# Altium footprint library Misc.PcbLib: 14 footprints
Each footprint in its own frame and in the unit in brackets; x right, y up, seen from the top. Pads: shape width x height; smd on the part's side, far side on the other; paste and mask are expansions set on the pad; w line width, h text height; cw(c..) or ccw(c..) is an arc to the next point about the centre after c.
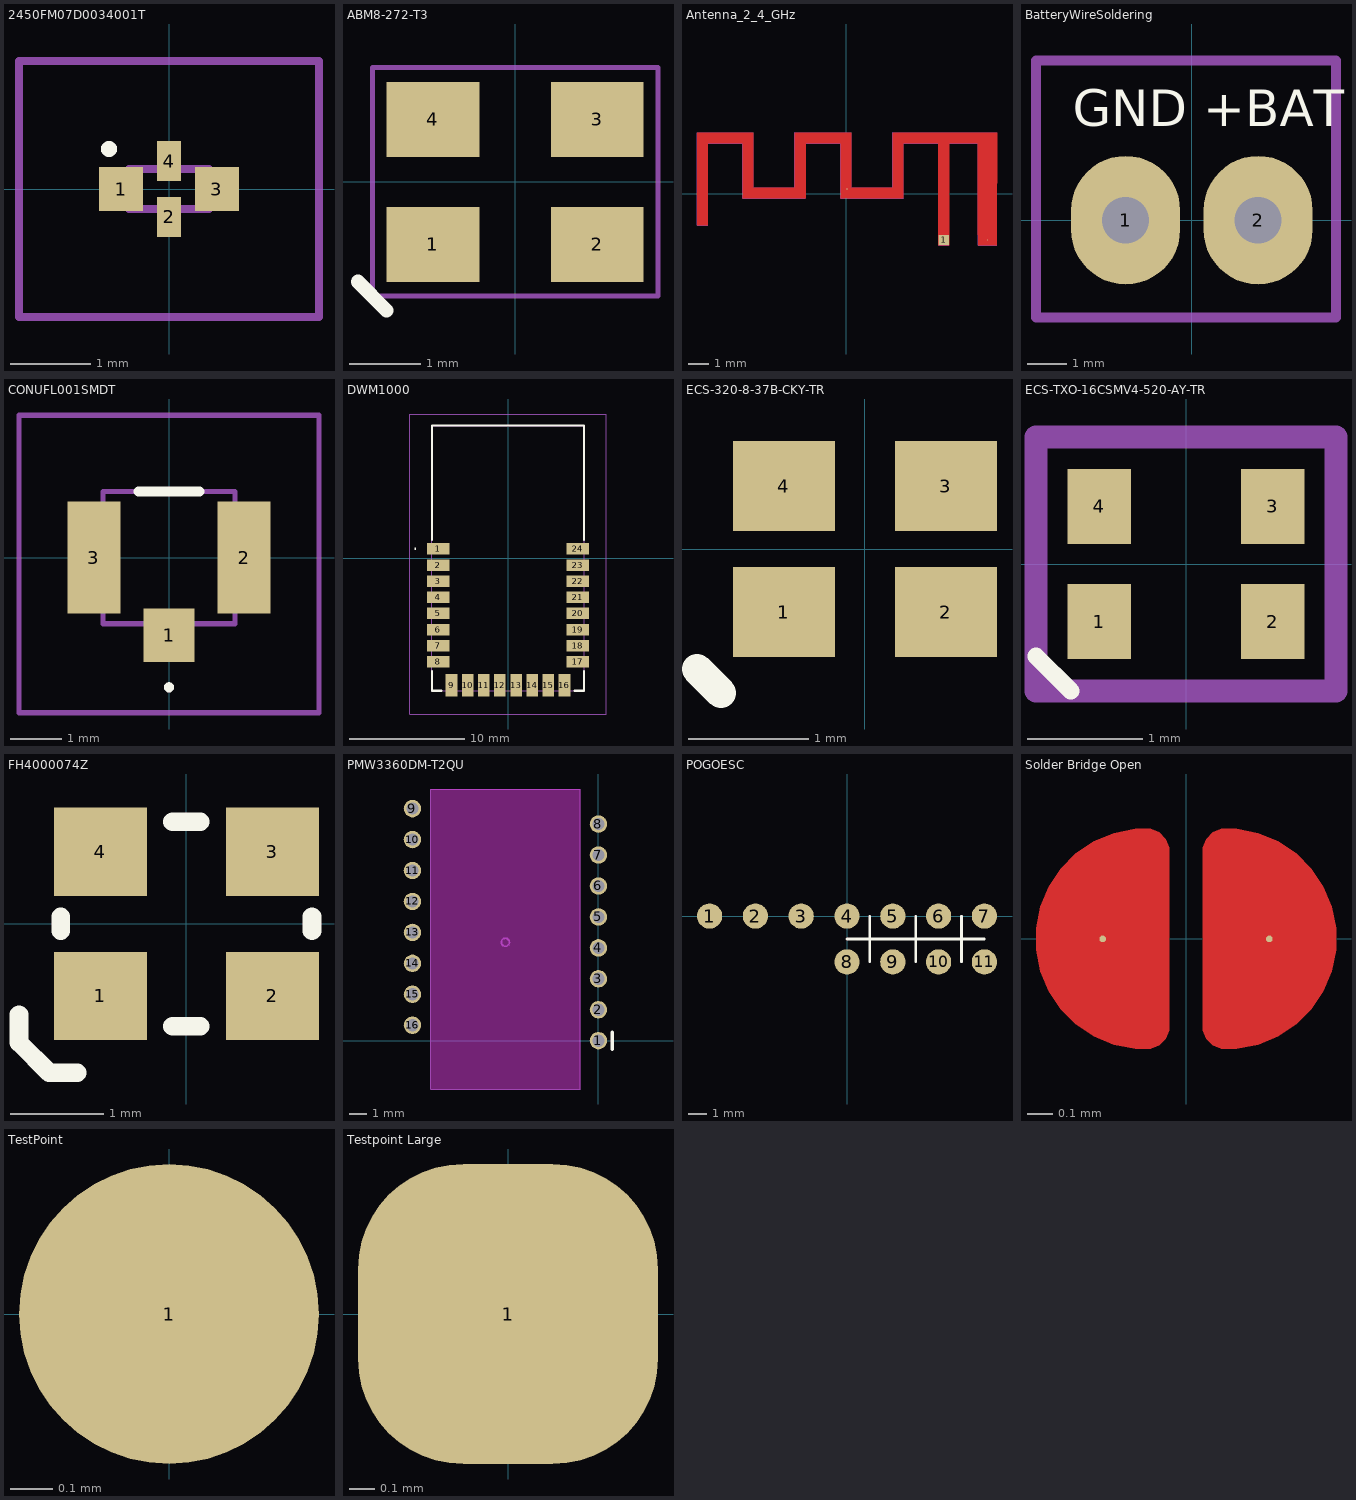
[diagram p0: the footprints below, top view; thin cyan lines are the x and y axes]

## 2450FM07D0034001T [mm]
pads (4):
  rect 0.55x0.55 smd mask-2539.97: 1(-0.6,0) 3(0.6,0)
  rect 0.3x0.5 smd mask+0.102: 2(0,-0.35) 4(0,0.35)
Top Overlay:
  lines w0.1: -0.8,0.5 cw(c-0.75,0.5) -0.7,0.5 cw(c-0.75,0.5) -0.8,0.5
Top Solder:
  region: -0.917,-0.377 -0.917,0.377 -0.163,0.377 -0.163,-0.377
  region: 0.163,-0.377 0.163,0.377 0.917,0.377 0.917,-0.377
Mechanical 15:
  lines w0.1: -0.5,-0.25 0.5,-0.25 0.5,0.25 -0.5,0.25 -0.5,-0.25
Mechanical 20:
  lines w0.1: -1.875,-1.6 1.875,-1.6 1.875,1.6 -1.875,1.6 -1.875,-1.6
3D body "2450FM07D0034001T.stp": height 0.41, standoff 0, extent -0.5,-0.25 0.5,0.25

## ABM8-272-T3 [mm] "Crystals Ultra Miniature Ceramic SMD Crystal / 3.2mm x 2.5mm"
pads (4):
  rect 1.3x1.05 smd mask+0.04: 1(-1.15,-0.875) 2(1.15,-0.875) 3(1.15,0.875) 4(-1.15,0.875)
Top Overlay:
  lines w0.2: -2.2,-1.4 -1.8,-1.8
Mechanical 15:
  lines w0.07: -2,-1.6 2,-1.6 2,1.6 -2,1.6 -2,-1.6
3D body "first version (pad distance not quite alright - datasheet is garbage) v1.step": height 0.8, standoff 0, extent -1.6,-1.25 1.6,1.25

## Antenna_2_4_GHz [mm] "2.4GHz antenna, 15.2x5.7"
pads (3):
  round 0.025 smd paste-2539.97 mask+0.102: 1(0.025,0.225) 2(6.775,-2.225)
  rect 0.5x0.5 smd mask+0: 1(4.68,-2.225)
Top Layer:
  region: 7.225,-1.982 6.325,-1.982 6.318,-1.975 6.318,2.418 4.932,2.418 4.932,-2.475 4.925,-2.482 4.425,-2.482 4.418,-2.475 4.418,2.418 2.732,2.418 2.732,-0.215 2.725,-0.222 -0.275,-0.222 -0.282,-0.215 -0.282,2.418 -1.968,2.418 -1.968,-0.215 -1.975,-0.222 -4.975,-0.222 -4.982,-0.215 -4.982,2.418 -6.668,2.418 -6.668,-1.515 -6.675,-1.522 -7.175,-1.522 -7.182,-1.515 -7.182,2.925 -7.175,2.932 -4.475,2.932 -4.468,2.925 -4.468,0.292 -2.482,0.292 -2.482,2.925 -2.475,2.932 0.225,2.932 0.232,2.925 0.232,0.292 2.218,0.292 2.218,2.925 2.225,2.932 7.225,2.932 7.232,2.925
  region: 7.225,-2.475 7.225,-1.975 6.325,-1.975 6.325,-2.475
Mechanical 1:
  lines w0.013: -7.175,2.425 -4.475,2.425 ; -7.175,2.425 -6.675,2.425 -6.675,-1.515 -7.175,-1.515 -7.175,2.425 ; -7.175,2.425 -7.175,2.925 -4.475,2.925 -4.475,2.425 ; -4.475,-0.215 -2.475,-0.215 ; -4.475,-0.215 -4.975,-0.215 -4.975,2.425 -4.475,2.425 ; -4.475,-0.215 -4.475,2.425 ; -4.475,-0.215 -4.475,0.285 -2.475,0.285 -2.475,-0.215 ; -2.475,-0.215 -1.975,-0.215 -1.975,2.425 -2.475,2.425 ; -2.475,-0.215 -2.475,2.425 ; -2.475,2.425 0.225,2.425 ; -2.475,2.425 -2.475,2.925 0.225,2.925 0.225,2.425 ; 0.225,-0.215 2.225,-0.215 ; 0.225,-0.215 -0.275,-0.215 -0.275,2.425 0.225,2.425 ; 0.225,-0.215 0.225,0.285 2.225,0.285 2.225,-0.215 ; 0.225,-0.215 0.225,2.425 ; 2.225,-0.215 2.725,-0.215 2.725,2.425 2.225,2.425 ; 2.225,-0.215 2.225,2.425 ; 2.225,2.425 7.225,2.425 ; 2.225,2.425 2.225,2.925 7.225,2.925 7.225,2.425 ; 4.425,-1.975 4.425,2.425 4.925,2.425 4.925,-1.975 ; 4.425,-1.975 4.925,-1.975 ; 4.425,-1.975 4.925,-1.975 ; 4.425,-1.975 4.425,-2.475 4.925,-2.475 4.925,-1.975 ; 6.325,-1.975 7.225,-1.975 ; 6.325,-1.975 6.325,-2.475 7.225,-2.475 7.225,-1.975 ; 6.325,-1.975 7.225,-1.975 ; 6.325,-1.975 6.325,2.425 7.225,2.425 ; 7.225,-1.975 7.225,2.425

## BatteryWireSoldering [mm]
pads (2):
  oval 2.8x3.3 hole 1.2 mask+0.035: 1(-1.7,0) 2(1.7,0)
Top Overlay:
  text "GND +BAT" at -3.057,2.108 h1.6
Mechanical 15:
  lines w0.254: -4,-2.5 3.7,-2.5 3.7,4.1 -4,4.1 -4,-2.5

## CONUFL001SMDT [mm]
pads (3):
  rect 1x1.05 smd: 1(0,-1.525)
  rect 1.05x2.2 smd: 2(1.475,0) 3(-1.475,0)
Top Overlay:
  lines w0.1: 0,-2.6 cw(c0,-2.55) 0,-2.5 cw(c0,-2.55) 0,-2.6
  lines w0.2: -0.6,1.3 0.6,1.3
Mechanical 15:
  lines w0.1: -1.3,-1.3 1.3,-1.3 1.3,1.3 -1.3,1.3 -1.3,-1.3
Mechanical 20:
  lines w0.1: -2.95,-3.05 2.95,-3.05 2.95,2.8 -2.95,2.8 -2.95,-3.05
3D body "CONUFL001-SMD-T.stp": height 1.3, standoff 0, extent -1.5,-1.55 1.5,1.55

## DWM1000 [mm]
pads (24):
  rect 1.95x1 smd: 1(-6.045,0.8) 2(-6.045,-0.6) 3(-6.045,-2) 4(-6.045,-3.4) 5(-6.045,-4.8) 6(-6.045,-6.2) 7(-6.045,-7.6) 8(-6.045,-9) 17(6.045,-9) 18(6.045,-7.6) 19(6.045,-6.2) 20(6.045,-4.8) 21(6.045,-3.4) 22(6.045,-2) 23(6.045,-0.6) 24(6.045,0.8)
  rect 1x1.95 smd: 9(-4.9,-11.045) 10(-3.5,-11.045) 11(-2.1,-11.045) 12(-0.7,-11.045) 13(0.7,-11.045) 14(2.1,-11.045) 15(3.5,-11.045) 16(4.9,-11.045)
Top Overlay:
  lines w0.1: -8.1,0.8 ccw(c-8.05,0.8) -8,0.8 ccw(c-8.05,0.8) -8.1,0.8
  lines w0.2: -6.6,-9.8 -6.6,-11.5 -5.8,-11.5 ; -6.6,1.6 -6.6,11.5 6.6,11.5 6.6,1.6 ; 5.8,-11.5 6.6,-11.5 6.6,-9.8
Mechanical 15:
  lines w0.1: -6.6,-11.5 -6.6,11.5 6.6,11.5 6.6,-11.5 -6.6,-11.5
Mechanical 20:
  lines w0.1: -8.52,-13.52 -8.52,12.5 8.52,12.5 8.52,-13.52 -8.52,-13.52
3D body "DWM1000.stp": height 3.15, standoff 0, extent -6.6,-11.5 6.6,11.5

## ECS-320-8-37B-CKY-TR [mm] "2.0mm x 1.6mm - Crystals 32MHz ESR 50 8pF-30C +85C"
pads (4):
  rect 0.85x0.75 smd mask+0.07: 1(-0.675,-0.525) 2(0.675,-0.525) 3(0.675,0.525) 4(-0.675,0.525)
Top Overlay:
  lines w0.254: -1.4,-1 -1.2,-1.2
3D body "ECS-320-8-37B-CKY-TR v3.step": height 0.45, standoff 0, extent -1,-0.8 1,0.8

## ECS-TXO-16CSMV4-520-AY-TR [mm] "TCXO Oscillators 52.000 MHz MultiVolt TCXO Clipped Sine Wave 1.7 - 3.6 0.5 ppm -30 - +85C 1.6 x 1.2 mm 4 Pad SM"
pads (4):
  rect 0.55x0.65 smd mask+0.04: 1(-0.75,-0.5) 2(0.75,-0.5) 3(0.75,0.5) 4(-0.75,0.5)
Top Overlay:
  lines w0.15: -1.3,-0.8 -1,-1.1
Mechanical 15:
  lines w0.2: -1.3,-1.1 1.3,-1.1 1.3,1.1 -1.3,1.1 -1.3,-1.1
3D body "ECS-TXO-16CSMV4.step": height 0.59, standoff 0, extent -0.8,-0.6 0.8,0.6

## FH4000074Z [mm] "Chrystal 40MHz 10ppm 8pF"
pads (4):
  rect 1x0.95 smd: 1(-0.925,-0.775) 2(0.925,-0.775) 3(0.925,0.775) 4(-0.925,0.775)
Top Overlay:
  lines w0.2: -1.8,-0.975 -1.8,-1.275 -1.475,-1.6 -1.175,-1.6 ; -1.35,-0.075 -1.35,0.075 ; -0.15,-1.1 0.15,-1.1 ; -0.15,1.1 0.15,1.1 ; 1.35,-0.075 1.35,0.075
3D body "FH4000074Z v5.step": height 0.61, standoff 0, extent -1.25,-1 1.25,1

## PMW3360DM-T2QU [mm] "Optical Gaming Navigation Chip"
pads (16):
  round 1 hole 0.7 mask+0.045: 1(0,0) 2(0,1.78) 3(0,3.56) 4(0,5.34) 5(0,7.12) 6(0,8.9) 7(0,10.68) 8(0,12.46) 9(-10.7,13.35) 10(-10.7,11.57) 11(-10.7,9.79) 12(-10.7,8.01) 13(-10.7,6.23) 14(-10.7,4.45) 15(-10.7,2.67) 16(-10.7,0.89)
Top Overlay:
  lines w0.2: 0.8,-0.5 0.8,0.5
Keep-Out Layer:
  board cut-out: -9.65,-2.78 -9.65,14.48 -1.05,14.48 -1.05,-2.78
Mechanical 1:
  lines w0: -9.65,-2.78 -1.05,-2.78 -1.05,14.48 -9.65,14.48 -9.65,-2.78
  text "SLOT" at -4.633,3.108 h1.52
Mechanical 15:
  circle w0.1: c-5.35,5.66 r0.23
3D body "PMW3360 v12.step": height 3.26, standoff -5.2, extent -14.775,-5.21 4.075,15.94

## POGOESC [mm] "Footprint for pogo pins programming the ESC AM32 boards"
pads (11):
  round 1.4 smd paste-2539.97 mask+0.035: 1(-7.62,0) 2(-5.08,0) 3(-2.54,0) 4(0,0) 5(2.54,0) 6(5.08,0) 7(7.62,0) 8(0,-2.54) 9(2.54,-2.54) 10(5.08,-2.54) 11(7.62,-2.54)
Top Overlay:
  lines w0.15: 0,-1.27 7.62,-1.27 ; 1.27,-2.54 1.27,0 ; 3.81,-2.54 3.81,0 ; 6.35,-2.54 6.35,0

## Solder Bridge Open [mil] "Simple small profile solder bridge, normally open"
pads (2):
  round 1 smd mask+1.38: 1(-12.68,0) 2(12.68,0)
Top Layer:
  region: -2.52,13.19 -2.52,-13.19 -2.52,-13.9 -3.06,-15.21 -4.07,-16.21 -5.37,-16.75 -6.08,-16.75 -7.73,-16.75 -10.97,-16.11 -14.02,-14.84 -16.76,-13.01 -19.09,-10.68 -20.93,-7.93 -22.19,-4.89 -22.83,-1.65 -22.83,1.65 -22.19,4.89 -20.93,7.93 -19.09,10.68 -16.76,13.01 -14.02,14.84 -10.97,16.11 -7.73,16.75 -6.08,16.75 -5.37,16.75 -4.07,16.21 -3.06,15.21 -2.52,13.9
  region: 2.52,-13.19 2.52,13.19 2.52,13.9 3.06,15.21 4.07,16.21 5.37,16.75 6.08,16.75 7.73,16.75 10.97,16.11 14.02,14.84 16.76,13.01 19.09,10.68 20.93,7.93 22.19,4.89 22.83,1.65 22.83,-1.65 22.19,-4.89 20.93,-7.93 19.09,-10.68 16.76,-13.01 14.02,-14.84 10.97,-16.11 7.73,-16.75 6.08,-16.75 5.37,-16.75 4.07,-16.21 3.06,-15.21 2.52,-13.9
Top Solder:
  region: -5.29,-18.13 5.32,-18.13 5.32,17.95 5.16,18.11 -5.52,18.11 -5.66,17.96

## TestPoint [mm] "High-density test point, diameter 0.7mm (very small)"
pads (1):
  round 0.7 smd paste-0.35 mask+0.035: 1(0,0)

## Testpoint Large [mm] "Testpoint / Test pad for measurements and soldering"
pads (1):
  rrect70% 1.2x1.2 smd mask+0.05: 1(0,0)